# Altium footprint library Package_DFN_QFN.PcbLib: 735 footprints (part 30 of 46)
Each footprint in its own frame and in the unit in brackets; x right, y up, seen from the top. Pads: shape width x height; smd on the part's side, far side on the other; paste and mask are expansions set on the pad; w line width, h text height; cw(c..) or ccw(c..) is an arc to the next point about the centre after c.
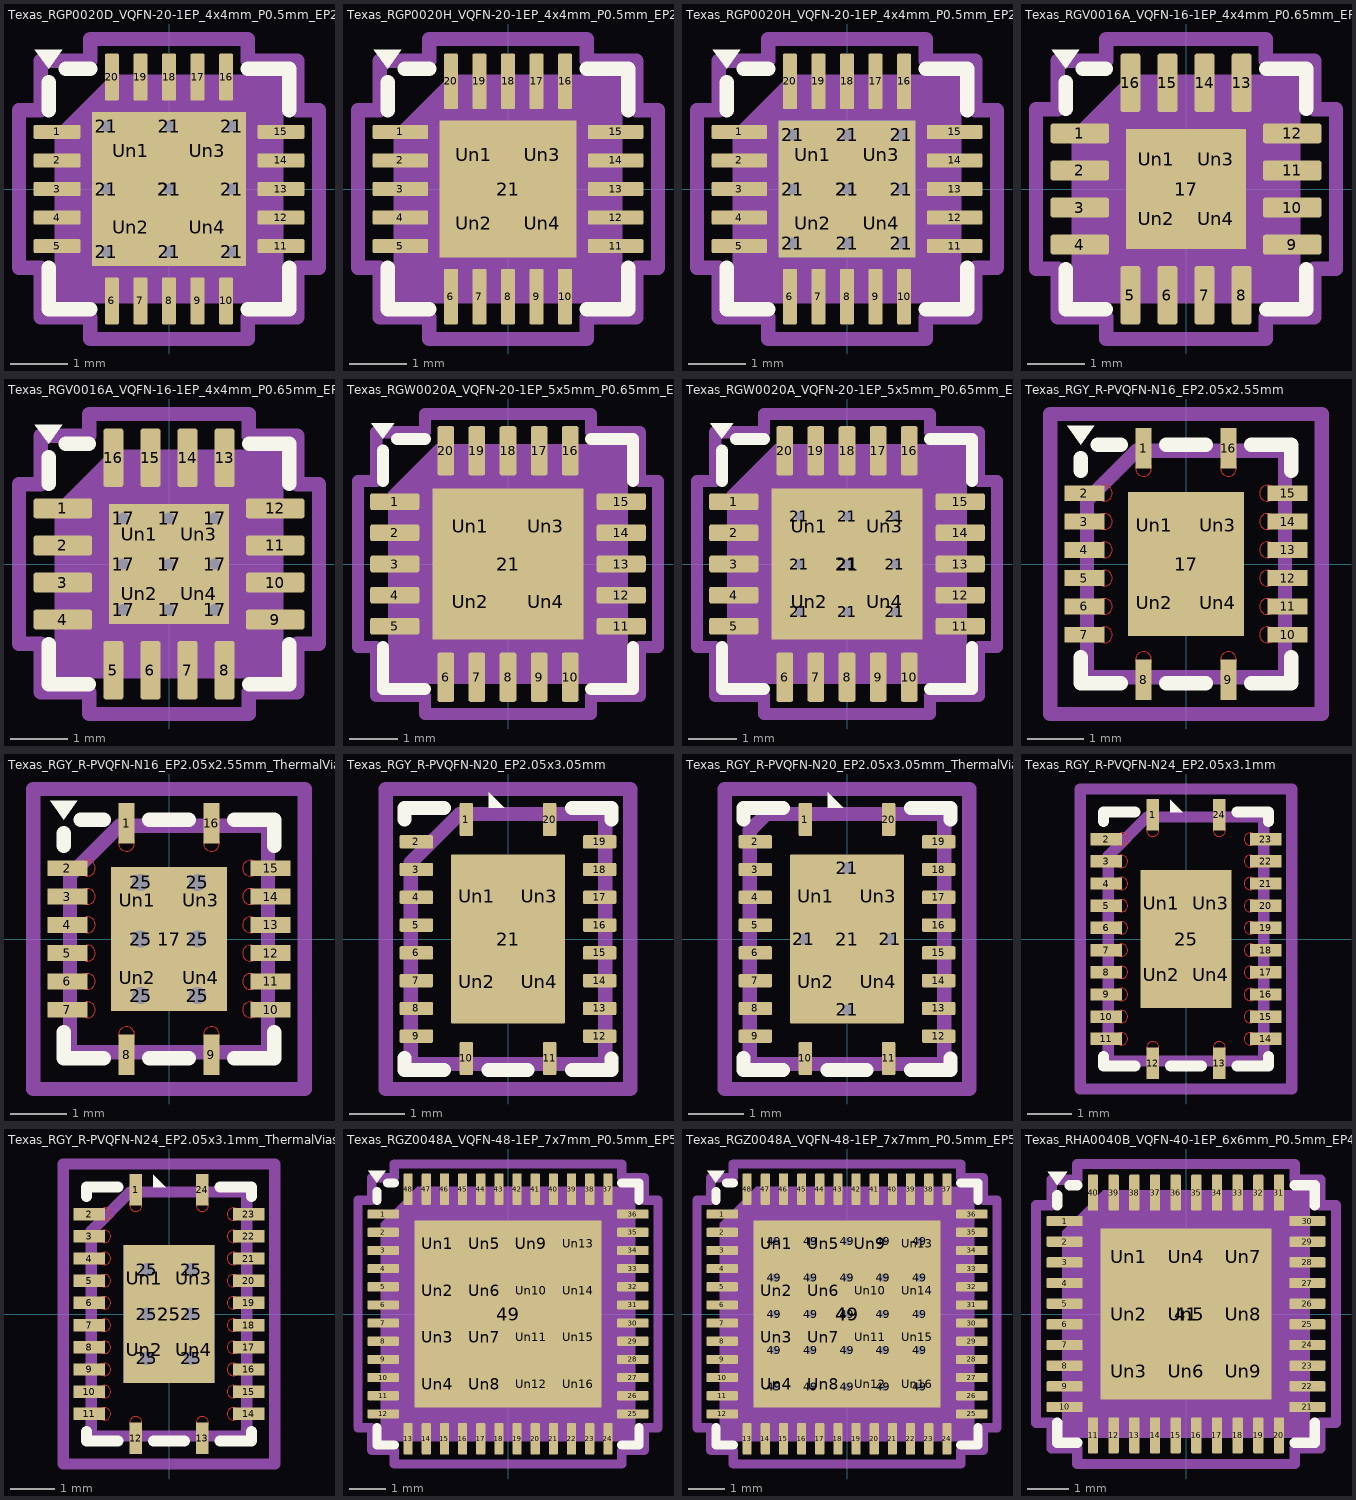
[diagram p29: the footprints below, top view; thin cyan lines are the x and y axes]

## Texas_RGP0020D_VQFN-20-1EP_4x4mm_P0.5mm_EP2.7x2.7mm_ThermalVias [mm] "Texas_RGP0020D_VQFN-20-1EP_4x4mm_P0.5mm_EP2.7x2.7mm_ThermalVias"
pads (35):
  rrect25% 0.825x0.25 smd: 1(-1.963,1) 2(-1.963,0.5) 3(-1.963,0) 4(-1.963,-0.5) 5(-1.963,-1) 11(1.963,-1) 12(1.963,-0.5) 13(1.963,0) 14(1.963,0.5) 15(1.963,1)
  rrect25% 0.25x0.825 smd: 6(-1,-1.963) 7(-0.5,-1.963) 8(0,-1.963) 9(0.5,-1.963) 10(1,-1.963) 16(1,1.963) 17(0.5,1.963) 18(0,1.963) 19(-0.5,1.963) 20(-1,1.963)
  round 0.5 hole 0.2: 21(-1.1,-1.1) 21(-1.1,0) 21(-1.1,1.1) 21(0,-1.1) 21(0,0) 21(0,1.1) 21(1.1,-1.1) 21(1.1,0) 21(1.1,1.1)
  rect 2.7x2.7 smd: 21(0,0)
  rect 2.7x2.7 smd far side: 21(0,0)
  rrect22% 1.13x1.13 on Top Paste: Un1(-0.675,0.675) Un2(-0.675,-0.675) Un3(0.675,0.675) Un4(0.675,-0.675)
F.SilkS:
  region: -2.11,2.11 -2.35,2.44 -1.87,2.44
  lines w0.254: -2.11,-1.385 -2.11,-2.11 -1.385,-2.11 ; -2.11,1.385 -2.11,1.87 ; -1.81,2.11 -1.385,2.11 ; 1.385,-2.11 2.11,-2.11 2.11,-1.385 ; 1.385,2.11 2.11,2.11 2.11,1.385
Top Component Center:
  lines w0.127: -0.127,0 0.127,0 -0.127,0 ; 0,-0.127 0,0.127 0,-0.127
Top Assembly:
  region: 2,-2 -2,-2 -2,1 -1,2 2,2
Top Courtyard:
  lines w0.254: -2.63,-1.38 -2.25,-1.38 -2.25,-2.25 -1.38,-2.25 -1.38,-2.63 1.38,-2.63 1.38,-2.25 2.25,-2.25 2.25,-1.38 2.63,-1.38 2.63,1.38 2.25,1.38 2.25,2.25 1.38,2.25 1.38,2.63 -1.38,2.63 -1.38,2.25 -2.25,2.25 -2.25,1.38 -2.63,1.38 -2.63,-1.38
Top Designator:
  text ".Designator" at -3.43,-0.344 h1.52

## Texas_RGP0020H_VQFN-20-1EP_4x4mm_P0.5mm_EP2.4x2.4mm [mm] "Texas_RGP0020H_VQFN-20-1EP_4x4mm_P0.5mm_EP2.4x2.4mm"
pads (25):
  rrect25% 0.975x0.25 smd: 1(-1.887,1) 2(-1.887,0.5) 3(-1.887,0) 4(-1.887,-0.5) 5(-1.887,-1) 11(1.887,-1) 12(1.887,-0.5) 13(1.887,0) 14(1.887,0.5) 15(1.887,1)
  rrect25% 0.25x0.975 smd: 6(-1,-1.887) 7(-0.5,-1.887) 8(0,-1.887) 9(0.5,-1.887) 10(1,-1.887) 16(1,1.887) 17(0.5,1.887) 18(0,1.887) 19(-0.5,1.887) 20(-1,1.887)
  rect 2.4x2.4 smd: 21(0,0)
  rrect25% 0.97x0.97 on Top Paste: Un1(-0.6,0.6) Un2(-0.6,-0.6) Un3(0.6,0.6) Un4(0.6,-0.6)
F.SilkS:
  region: -2.11,2.11 -2.35,2.44 -1.87,2.44
  lines w0.254: -2.11,-1.385 -2.11,-2.11 -1.385,-2.11 ; -2.11,1.385 -2.11,1.87 ; -1.81,2.11 -1.385,2.11 ; 1.385,-2.11 2.11,-2.11 2.11,-1.385 ; 1.385,2.11 2.11,2.11 2.11,1.385
Top Component Center:
  lines w0.127: -0.127,0 0.127,0 -0.127,0 ; 0,-0.127 0,0.127 0,-0.127
Top Assembly:
  region: 2,-2 -2,-2 -2,1 -1,2 2,2
Top Courtyard:
  lines w0.254: -2.63,-1.38 -2.25,-1.38 -2.25,-2.25 -1.38,-2.25 -1.38,-2.63 1.38,-2.63 1.38,-2.25 2.25,-2.25 2.25,-1.38 2.63,-1.38 2.63,1.38 2.25,1.38 2.25,2.25 1.38,2.25 1.38,2.63 -1.38,2.63 -1.38,2.25 -2.25,2.25 -2.25,1.38 -2.63,1.38 -2.63,-1.38
Top Designator:
  text ".Designator" at -3.43,-0.344 h1.52
3D body "Texas_RGP0020H_VQFN-20-1EP_4x4mm_P0.5mm_EP2.4x2.4mm.step": height 0.8, standoff 0, extent -2,-2 2,2

## Texas_RGP0020H_VQFN-20-1EP_4x4mm_P0.5mm_EP2.4x2.4mm_ThermalVias [mm] "Texas_RGP0020H_VQFN-20-1EP_4x4mm_P0.5mm_EP2.4x2.4mm_ThermalVias"
pads (35):
  rrect25% 0.975x0.25 smd: 1(-1.887,1) 2(-1.887,0.5) 3(-1.887,0) 4(-1.887,-0.5) 5(-1.887,-1) 11(1.887,-1) 12(1.887,-0.5) 13(1.887,0) 14(1.887,0.5) 15(1.887,1)
  rrect25% 0.25x0.975 smd: 6(-1,-1.887) 7(-0.5,-1.887) 8(0,-1.887) 9(0.5,-1.887) 10(1,-1.887) 16(1,1.887) 17(0.5,1.887) 18(0,1.887) 19(-0.5,1.887) 20(-1,1.887)
  round 0.5 hole 0.2: 21(-0.95,-0.95) 21(-0.95,0) 21(-0.95,0.95) 21(0,-0.95) 21(0,0) 21(0,0.95) 21(0.95,-0.95) 21(0.95,0) 21(0.95,0.95)
  rect 2.4x2.4 smd: 21(0,0)
  rect 2.4x2.4 smd far side: 21(0,0)
  rrect25% 0.85x0.85 on Top Paste: Un1(-0.6,0.6) Un2(-0.6,-0.6) Un3(0.6,0.6) Un4(0.6,-0.6)
F.SilkS:
  region: -2.11,2.11 -2.35,2.44 -1.87,2.44
  lines w0.254: -2.11,-1.385 -2.11,-2.11 -1.385,-2.11 ; -2.11,1.385 -2.11,1.87 ; -1.81,2.11 -1.385,2.11 ; 1.385,-2.11 2.11,-2.11 2.11,-1.385 ; 1.385,2.11 2.11,2.11 2.11,1.385
Top Component Center:
  lines w0.127: -0.127,0 0.127,0 -0.127,0 ; 0,-0.127 0,0.127 0,-0.127
Top Assembly:
  region: 2,-2 -2,-2 -2,1 -1,2 2,2
Top Courtyard:
  lines w0.254: -2.63,-1.38 -2.63,1.38 -2.25,1.38 -2.25,2.25 -1.38,2.25 -1.38,2.63 1.38,2.63 1.38,2.25 2.25,2.25 2.25,1.38 2.63,1.38 2.63,-1.38 2.25,-1.38 2.25,-2.25 1.38,-2.25 1.38,-2.63 -1.38,-2.63 -1.38,-2.25 -2.25,-2.25 -2.25,-1.38 -2.63,-1.38
Top Designator:
  text ".Designator" at -3.43,-0.344 h1.52
3D body "Texas_RGP0020H_VQFN-20-1EP_4x4mm_P0.5mm_EP2.4x2.4mm.step": height 0.8, standoff 0, extent -2,-2 2,2

## Texas_RGV0016A_VQFN-16-1EP_4x4mm_P0.65mm_EP2.1x2.1mm [mm] "Texas_RGV0016A_VQFN-16-1EP_4x4mm_P0.65mm_EP2.1x2.1mm"
pads (21):
  rrect25% 1.025x0.35 smd: 1(-1.863,0.975) 2(-1.863,0.325) 3(-1.863,-0.325) 4(-1.863,-0.975) 9(1.863,-0.975) 10(1.863,-0.325) 11(1.863,0.325) 12(1.863,0.975)
  rrect25% 0.35x1.025 smd: 5(-0.975,-1.863) 6(-0.325,-1.863) 7(0.325,-1.863) 8(0.975,-1.863) 13(0.975,1.863) 14(0.325,1.863) 15(-0.325,1.863) 16(-0.975,1.863)
  rect 2.1x2.1 smd: 17(0,0)
  rrect25% 0.85x0.85 on Top Paste: Un1(-0.525,0.525) Un2(-0.525,-0.525) Un3(0.525,0.525) Un4(0.525,-0.525)
F.SilkS:
  region: -2.11,2.11 -2.35,2.44 -1.87,2.44
  lines w0.254: -2.11,-1.41 -2.11,-2.11 -1.41,-2.11 ; -2.11,1.41 -2.11,1.87 ; -1.81,2.11 -1.41,2.11 ; 1.41,-2.11 2.11,-2.11 2.11,-1.41 ; 1.41,2.11 2.11,2.11 2.11,1.41
Top Component Center:
  lines w0.127: -0.127,0 0.127,0 -0.127,0 ; 0,-0.127 0,0.127 0,-0.127
Top Assembly:
  region: 2,-2 -2,-2 -2,1 -1,2 2,2
Top Courtyard:
  lines w0.254: -2.63,-1.4 -2.25,-1.4 -2.25,-2.25 -1.4,-2.25 -1.4,-2.63 1.4,-2.63 1.4,-2.25 2.25,-2.25 2.25,-1.4 2.63,-1.4 2.63,1.4 2.25,1.4 2.25,2.25 1.4,2.25 1.4,2.63 -1.4,2.63 -1.4,2.25 -2.25,2.25 -2.25,1.4 -2.63,1.4 -2.63,-1.4
Top Designator:
  text ".Designator" at -3.43,-0.344 h1.52

## Texas_RGV0016A_VQFN-16-1EP_4x4mm_P0.65mm_EP2.1x2.1mm_ThermalVias [mm] "Texas_RGV0016A_VQFN-16-1EP_4x4mm_P0.65mm_EP2.1x2.1mm_ThermalVias"
pads (31):
  rrect25% 1.025x0.35 smd: 1(-1.863,0.975) 2(-1.863,0.325) 3(-1.863,-0.325) 4(-1.863,-0.975) 9(1.863,-0.975) 10(1.863,-0.325) 11(1.863,0.325) 12(1.863,0.975)
  rrect25% 0.35x1.025 smd: 5(-0.975,-1.863) 6(-0.325,-1.863) 7(0.325,-1.863) 8(0.975,-1.863) 13(0.975,1.863) 14(0.325,1.863) 15(-0.325,1.863) 16(-0.975,1.863)
  round 0.5 hole 0.2: 17(-0.8,-0.8) 17(-0.8,0) 17(-0.8,0.8) 17(0,-0.8) 17(0,0) 17(0,0.8) 17(0.8,-0.8) 17(0.8,0) 17(0.8,0.8)
  rect 2.1x2.1 smd: 17(0,0)
  rect 2.1x2.1 smd far side: 17(0,0)
  rrect25% 0.91x0.91 on Top Paste: Un1(-0.525,0.525) Un2(-0.525,-0.525) Un3(0.525,0.525) Un4(0.525,-0.525)
F.SilkS:
  region: -2.11,2.11 -2.35,2.44 -1.87,2.44
  lines w0.254: -2.11,-1.41 -2.11,-2.11 -1.41,-2.11 ; -2.11,1.41 -2.11,1.87 ; -1.81,2.11 -1.41,2.11 ; 1.41,-2.11 2.11,-2.11 2.11,-1.41 ; 1.41,2.11 2.11,2.11 2.11,1.41
Top Component Center:
  lines w0.127: -0.127,0 0.127,0 -0.127,0 ; 0,-0.127 0,0.127 0,-0.127
Top Assembly:
  region: 2,-2 -2,-2 -2,1 -1,2 2,2
Top Courtyard:
  lines w0.254: -2.63,-1.4 -2.25,-1.4 -2.25,-2.25 -1.4,-2.25 -1.4,-2.63 1.4,-2.63 1.4,-2.25 2.25,-2.25 2.25,-1.4 2.63,-1.4 2.63,1.4 2.25,1.4 2.25,2.25 1.4,2.25 1.4,2.63 -1.4,2.63 -1.4,2.25 -2.25,2.25 -2.25,1.4 -2.63,1.4 -2.63,-1.4
Top Designator:
  text ".Designator" at -3.43,-0.344 h1.52

## Texas_RGW0020A_VQFN-20-1EP_5x5mm_P0.65mm_EP3.15x3.15mm [mm] "Texas_RGW0020A_VQFN-20-1EP_5x5mm_P0.65mm_EP3.15x3.15mm"
pads (25):
  rrect25% 1.025x0.35 smd: 1(-2.362,1.3) 2(-2.362,0.65) 3(-2.362,0) 4(-2.362,-0.65) 5(-2.362,-1.3) 11(2.362,-1.3) 12(2.362,-0.65) 13(2.362,0) 14(2.362,0.65) 15(2.362,1.3)
  rrect25% 0.35x1.025 smd: 6(-1.3,-2.362) 7(-0.65,-2.362) 8(0,-2.362) 9(0.65,-2.362) 10(1.3,-2.362) 16(1.3,2.362) 17(0.65,2.362) 18(0,2.362) 19(-0.65,2.362) 20(-1.3,2.362)
  rect 3.15x3.15 smd: 21(0,0)
  rrect20% 1.27x1.27 on Top Paste: Un1(-0.79,0.79) Un2(-0.79,-0.79) Un3(0.79,0.79) Un4(0.79,-0.79)
F.SilkS:
  region: -2.61,2.61 -2.85,2.94 -2.37,2.94
  lines w0.254: -2.61,-1.735 -2.61,-2.61 -1.735,-2.61 ; -2.61,1.735 -2.61,2.37 ; -2.31,2.61 -1.735,2.61 ; 1.735,-2.61 2.61,-2.61 2.61,-1.735 ; 1.735,2.61 2.61,2.61 2.61,1.735
Top Component Center:
  lines w0.127: -0.127,0 0.127,0 -0.127,0 ; 0,-0.127 0,0.127 0,-0.127
Top Assembly:
  region: 2.5,-2.5 -2.5,-2.5 -2.5,1.5 -1.5,2.5 2.5,2.5
Top Courtyard:
  lines w0.254: -3.13,-1.73 -2.75,-1.73 -2.75,-2.75 -1.73,-2.75 -1.73,-3.13 1.73,-3.13 1.73,-2.75 2.75,-2.75 2.75,-1.73 3.13,-1.73 3.13,1.73 2.75,1.73 2.75,2.75 1.73,2.75 1.73,3.13 -1.73,3.13 -1.73,2.75 -2.75,2.75 -2.75,1.73 -3.13,1.73 -3.13,-1.73
Top Designator:
  text ".Designator" at -3.43,-0.344 h1.52
3D body "Texas_RGW0020A_VQFN-20-1EP_5x5mm_P0.65mm_EP3.15x3.15mm.step": height 0.8, standoff 0, extent -2.5,-2.5 2.5,2.5

## Texas_RGW0020A_VQFN-20-1EP_5x5mm_P0.65mm_EP3.15x3.15mm_ThermalVias [mm] "Texas_RGW0020A_VQFN-20-1EP_5x5mm_P0.65mm_EP3.15x3.15mm_ThermalVias"
pads (35):
  rrect25% 1.025x0.35 smd: 1(-2.362,1.3) 2(-2.362,0.65) 3(-2.362,0) 4(-2.362,-0.65) 5(-2.362,-1.3) 11(2.362,-1.3) 12(2.362,-0.65) 13(2.362,0) 14(2.362,0.65) 15(2.362,1.3)
  rrect25% 0.35x1.025 smd: 6(-1.3,-2.362) 7(-0.65,-2.362) 8(0,-2.362) 9(0.65,-2.362) 10(1.3,-2.362) 16(1.3,2.362) 17(0.65,2.362) 18(0,2.362) 19(-0.65,2.362) 20(-1.3,2.362)
  round 0.5 hole 0.2: 21(-1,-1) 21(-1,0) 21(-1,1) 21(0,-1) 21(0,0) 21(0,1) 21(1,-1) 21(1,0) 21(1,1)
  rect 3.15x3.15 smd: 21(0,0)
  rect 2.5x2.5 smd far side: 21(0,0)
  rrect20% 1.27x1.27 on Top Paste: Un1(-0.79,0.79) Un2(-0.79,-0.79) Un3(0.79,0.79) Un4(0.79,-0.79)
F.SilkS:
  region: -2.61,2.61 -2.85,2.94 -2.37,2.94
  lines w0.254: -2.61,-1.735 -2.61,-2.61 -1.735,-2.61 ; -2.61,1.735 -2.61,2.37 ; -2.31,2.61 -1.735,2.61 ; 1.735,-2.61 2.61,-2.61 2.61,-1.735 ; 1.735,2.61 2.61,2.61 2.61,1.735
Top Component Center:
  lines w0.127: -0.127,0 0.127,0 -0.127,0 ; 0,-0.127 0,0.127 0,-0.127
Top Assembly:
  region: 2.5,-2.5 -2.5,-2.5 -2.5,1.5 -1.5,2.5 2.5,2.5
Top Courtyard:
  lines w0.254: -3.13,-1.73 -2.75,-1.73 -2.75,-2.75 -1.73,-2.75 -1.73,-3.13 1.73,-3.13 1.73,-2.75 2.75,-2.75 2.75,-1.73 3.13,-1.73 3.13,1.73 2.75,1.73 2.75,2.75 1.73,2.75 1.73,3.13 -1.73,3.13 -1.73,2.75 -2.75,2.75 -2.75,1.73 -3.13,1.73 -3.13,-1.73
Top Designator:
  text ".Designator" at -3.43,-0.344 h1.52
3D body "Texas_RGW0020A_VQFN-20-1EP_5x5mm_P0.65mm_EP3.15x3.15mm.step": height 0.8, standoff 0, extent -2.5,-2.5 2.5,2.5

## Texas_RGY_R-PVQFN-N16_EP2.05x2.55mm [mm] "Texas_RGY_R-PVQFN-N16_EP2.05x2.55mm"
pads (21):
  rect 0.28x0.71 smd: 1(-0.75,2.045) 8(-0.75,-2.045) 9(0.75,-2.045) 16(0.75,2.045)
  rect 0.71x0.28 smd: 2(-1.795,1.25) 3(-1.795,0.75) 4(-1.795,0.25) 5(-1.795,-0.25) 6(-1.795,-0.75) 7(-1.795,-1.25) 10(1.795,-1.25) 11(1.795,-0.75) 12(1.795,-0.25) 13(1.795,0.25) 14(1.795,0.75) 15(1.795,1.25)
  rect 2.05x2.55 smd: 17(0,0)
  rect 0.82x1.07 on Top Paste: Un1(-0.56,0.685) Un2(-0.56,-0.685) Un3(0.56,0.685) Un4(0.56,-0.685)
F.Cu:
  circle w0: c0.75,1.69 r0.14
  circle w0: c1.44,1.25 r0.14
  circle w0: c1.44,0.75 r0.14
  circle w0: c1.44,0.25 r0.14
  circle w0: c1.44,-0.25 r0.14
  circle w0: c1.44,-0.75 r0.14
  circle w0: c1.44,-1.25 r0.14
  circle w0: c0.75,-1.69 r0.14
  circle w0: c-0.75,-1.69 r0.14
  circle w0: c-1.44,-1.25 r0.14
  circle w0: c-1.44,-0.75 r0.14
  circle w0: c-1.44,-0.25 r0.14
  circle w0: c-1.44,0.25 r0.14
  circle w0: c-1.44,0.75 r0.14
  circle w0: c-1.44,1.25 r0.14
  circle w0: c-0.75,1.69 r0.14
F.SilkS:
  region: -1.86,2.11 -2.1,2.44 -1.62,2.44
  lines w0.254: -1.86,-1.65 -1.86,-2.11 -1.15,-2.11 ; -1.86,1.65 -1.86,1.87 ; -1.56,2.11 -1.15,2.11 ; -0.35,-2.11 0.35,-2.11 ; -0.35,2.11 0.35,2.11 ; 1.15,-2.11 1.86,-2.11 1.86,-1.65 ; 1.15,2.11 1.86,2.11 1.86,1.65
F.Paste:
  circle w0: c0.75,1.69 r0.14
  circle w0: c1.44,1.25 r0.14
  circle w0: c1.44,0.75 r0.14
  circle w0: c1.44,0.25 r0.14
  circle w0: c1.44,-0.25 r0.14
  circle w0: c1.44,-0.75 r0.14
  circle w0: c1.44,-1.25 r0.14
  circle w0: c0.75,-1.69 r0.14
  circle w0: c-0.75,-1.69 r0.14
  circle w0: c-1.44,-1.25 r0.14
  circle w0: c-1.44,-0.75 r0.14
  circle w0: c-1.44,-0.25 r0.14
  circle w0: c-1.44,0.25 r0.14
  circle w0: c-1.44,0.75 r0.14
  circle w0: c-1.44,1.25 r0.14
  circle w0: c-0.75,1.69 r0.14
F.Mask:
  circle w0: c0.75,1.69 r0.14
  circle w0: c1.44,1.25 r0.14
  circle w0: c1.44,0.75 r0.14
  circle w0: c1.44,0.25 r0.14
  circle w0: c1.44,-0.25 r0.14
  circle w0: c1.44,-0.75 r0.14
  circle w0: c1.44,-1.25 r0.14
  circle w0: c0.75,-1.69 r0.14
  circle w0: c-0.75,-1.69 r0.14
  circle w0: c-1.44,-1.25 r0.14
  circle w0: c-1.44,-0.75 r0.14
  circle w0: c-1.44,-0.25 r0.14
  circle w0: c-1.44,0.25 r0.14
  circle w0: c-1.44,0.75 r0.14
  circle w0: c-1.44,1.25 r0.14
  circle w0: c-0.75,1.69 r0.14
Top Component Center:
  lines w0.127: -0.127,0 0.127,0 -0.127,0 ; 0,-0.127 0,0.127 0,-0.127
Top Assembly:
  lines w0.254: -1.75,-2 1.75,-2 1.75,2 -0.875,2 -1.75,1.125 -1.75,-2
Top Courtyard:
  lines w0.254: -2.4,-2.65 2.4,-2.65 2.4,2.65 -2.4,2.65 -2.4,-2.65
Top Designator:
  text ".Designator" at -3.43,-0.344 h1.52

## Texas_RGY_R-PVQFN-N16_EP2.05x2.55mm_ThermalVias [mm] "Texas_RGY_R-PVQFN-N16_EP2.05x2.55mm_ThermalVias"
pads (27):
  rect 0.28x0.71 smd: 1(-0.75,2.045) 8(-0.75,-2.045) 9(0.75,-2.045) 16(0.75,2.045)
  rect 0.71x0.28 smd: 2(-1.795,1.25) 3(-1.795,0.75) 4(-1.795,0.25) 5(-1.795,-0.25) 6(-1.795,-0.75) 7(-1.795,-1.25) 10(1.795,-1.25) 11(1.795,-0.75) 12(1.795,-0.25) 13(1.795,0.25) 14(1.795,0.75) 15(1.795,1.25)
  rect 2.05x2.55 smd: 17(0,0)
  round 0.5 hole 0.3: 25(-0.5,-1) 25(-0.5,0) 25(-0.5,1) 25(0.5,-1) 25(0.5,0) 25(0.5,1)
  rect 0.82x1.07 on Top Paste: Un1(-0.56,0.685) Un2(-0.56,-0.685) Un3(0.56,0.685) Un4(0.56,-0.685)
F.Cu:
  circle w0: c0.75,1.69 r0.14
  circle w0: c1.44,1.25 r0.14
  circle w0: c1.44,0.75 r0.14
  circle w0: c1.44,0.25 r0.14
  circle w0: c1.44,-0.25 r0.14
  circle w0: c1.44,-0.75 r0.14
  circle w0: c1.44,-1.25 r0.14
  circle w0: c0.75,-1.69 r0.14
  circle w0: c-0.75,-1.69 r0.14
  circle w0: c-1.44,-1.25 r0.14
  circle w0: c-1.44,-0.75 r0.14
  circle w0: c-1.44,-0.25 r0.14
  circle w0: c-1.44,0.25 r0.14
  circle w0: c-1.44,0.75 r0.14
  circle w0: c-1.44,1.25 r0.14
  circle w0: c-0.75,1.69 r0.14
F.SilkS:
  region: -1.86,2.11 -2.1,2.44 -1.62,2.44
  lines w0.254: -1.86,-1.65 -1.86,-2.11 -1.15,-2.11 ; -1.86,1.65 -1.86,1.87 ; -1.56,2.11 -1.15,2.11 ; -0.35,-2.11 0.35,-2.11 ; -0.35,2.11 0.35,2.11 ; 1.15,-2.11 1.86,-2.11 1.86,-1.65 ; 1.15,2.11 1.86,2.11 1.86,1.65
F.Paste:
  circle w0: c0.75,1.69 r0.14
  circle w0: c1.44,1.25 r0.14
  circle w0: c1.44,0.75 r0.14
  circle w0: c1.44,0.25 r0.14
  circle w0: c1.44,-0.25 r0.14
  circle w0: c1.44,-0.75 r0.14
  circle w0: c1.44,-1.25 r0.14
  circle w0: c0.75,-1.69 r0.14
  circle w0: c-0.75,-1.69 r0.14
  circle w0: c-1.44,-1.25 r0.14
  circle w0: c-1.44,-0.75 r0.14
  circle w0: c-1.44,-0.25 r0.14
  circle w0: c-1.44,0.25 r0.14
  circle w0: c-1.44,0.75 r0.14
  circle w0: c-1.44,1.25 r0.14
  circle w0: c-0.75,1.69 r0.14
F.Mask:
  circle w0: c0.75,1.69 r0.14
  circle w0: c1.44,1.25 r0.14
  circle w0: c1.44,0.75 r0.14
  circle w0: c1.44,0.25 r0.14
  circle w0: c1.44,-0.25 r0.14
  circle w0: c1.44,-0.75 r0.14
  circle w0: c1.44,-1.25 r0.14
  circle w0: c0.75,-1.69 r0.14
  circle w0: c-0.75,-1.69 r0.14
  circle w0: c-1.44,-1.25 r0.14
  circle w0: c-1.44,-0.75 r0.14
  circle w0: c-1.44,-0.25 r0.14
  circle w0: c-1.44,0.25 r0.14
  circle w0: c-1.44,0.75 r0.14
  circle w0: c-1.44,1.25 r0.14
  circle w0: c-0.75,1.69 r0.14
Top Component Center:
  lines w0.127: -0.127,0 0.127,0 -0.127,0 ; 0,-0.127 0,0.127 0,-0.127
Top Assembly:
  lines w0.254: -1.75,-2 1.75,-2 1.75,2 -0.875,2 -1.75,1.125 -1.75,-2
Top Courtyard:
  lines w0.254: -2.4,-2.65 2.4,-2.65 2.4,2.65 -2.4,2.65 -2.4,-2.65
Top Designator:
  text ".Designator" at -3.43,-0.344 h1.52

## Texas_RGY_R-PVQFN-N20_EP2.05x3.05mm [mm] "Texas_RGY_R-PVQFN-N20_EP2.05x3.05mm"
pads (25):
  rrect21% 0.24x0.6 smd: 1(-0.75,2.15) 10(-0.75,-2.15) 11(0.75,-2.15) 20(0.75,2.15)
  rrect21% 0.6x0.24 smd: 2(-1.65,1.75) 3(-1.65,1.25) 4(-1.65,0.75) 5(-1.65,0.25) 6(-1.65,-0.25) 7(-1.65,-0.75) 8(-1.65,-1.25) 9(-1.65,-1.75) 12(1.65,-1.75) 13(1.65,-1.25) 14(1.65,-0.75) 15(1.65,-0.25) 16(1.65,0.25) 17(1.65,0.75) 18(1.65,1.25) 19(1.65,1.75)
  rrect2% 2.05x3.05 smd: 21(0,0)
  rect 0.92x1.33 on Top Paste: Un1(-0.56,0.77) Un2(-0.56,-0.77) Un3(0.56,0.77) Un4(0.56,-0.77)
F.SilkS:
  region: -0.07,2.36 -0.35,2.36 -0.35,2.64
  lines w0.254: -1.86,-2.145 -1.86,-2.355 -1.15,-2.355 ; -1.86,2.15 -1.86,2.36 -1.15,2.36 ; -0.35,-2.36 0.35,-2.36 ; 1.15,-2.36 1.86,-2.36 1.86,-2.15 ; 1.15,2.36 1.86,2.36 1.86,2.15
Top Component Center:
  lines w0.127: -0.127,0 0.127,0 -0.127,0 ; 0,-0.127 0,0.127 0,-0.127
Top Assembly:
  lines w0.254: -1.75,-2.25 1.75,-2.25 1.75,2.25 -0.875,2.25 -1.75,1.375 -1.75,-2.25
Top Courtyard:
  lines w0.254: -2.2,-2.7 2.2,-2.7 2.2,2.7 -2.2,2.7 -2.2,-2.7
Top Designator:
  text ".Designator" at -3.43,-0.344 h1.52
3D body "Texas_RGY_R-PVQFN-N20_EP2.05x3.05mm.step": height 0.92, standoff 0, extent -1.75,-2.25 1.75,2.25

## Texas_RGY_R-PVQFN-N20_EP2.05x3.05mm_ThermalVias [mm] "Texas_RGY_R-PVQFN-N20_EP2.05x3.05mm_ThermalVias"
pads (29):
  rrect21% 0.24x0.6 smd: 1(-0.75,2.15) 10(-0.75,-2.15) 11(0.75,-2.15) 20(0.75,2.15)
  rrect21% 0.6x0.24 smd: 2(-1.65,1.75) 3(-1.65,1.25) 4(-1.65,0.75) 5(-1.65,0.25) 6(-1.65,-0.25) 7(-1.65,-0.75) 8(-1.65,-1.25) 9(-1.65,-1.75) 12(1.65,-1.75) 13(1.65,-1.25) 14(1.65,-0.75) 15(1.65,-0.25) 16(1.65,0.25) 17(1.65,0.75) 18(1.65,1.25) 19(1.65,1.75)
  round 0.5 hole 0.2: 21(-0.775,0) 21(0,-1.275) 21(0,1.275) 21(0.775,0)
  rrect2% 2.05x3.05 smd: 21(0,0)
  rect 0.92x1.33 on Top Paste: Un1(-0.56,0.77) Un2(-0.56,-0.77) Un3(0.56,0.77) Un4(0.56,-0.77)
F.SilkS:
  region: -0.07,2.36 -0.35,2.36 -0.35,2.64
  lines w0.254: -1.86,-2.145 -1.86,-2.355 -1.15,-2.355 ; -1.86,2.15 -1.86,2.36 -1.15,2.36 ; -0.35,-2.36 0.35,-2.36 ; 1.15,-2.36 1.86,-2.36 1.86,-2.15 ; 1.15,2.36 1.86,2.36 1.86,2.15
Top Component Center:
  lines w0.127: -0.127,0 0.127,0 -0.127,0 ; 0,-0.127 0,0.127 0,-0.127
Top Assembly:
  lines w0.254: -1.75,-2.25 1.75,-2.25 1.75,2.25 -1.45,2.25 -1.75,1.95 -1.75,-2.25
Top Courtyard:
  lines w0.254: -2.2,-2.7 2.2,-2.7 2.2,2.7 -2.2,2.7 -2.2,-2.7
Top Designator:
  text ".Designator" at -3.43,-0.344 h1.52
3D body "Texas_RGY_R-PVQFN-N20_EP2.05x3.05mm.step": height 0.92, standoff 0, extent -1.75,-2.25 1.75,2.25

## Texas_RGY_R-PVQFN-N24_EP2.05x3.1mm [mm] "Texas_RGY_R-PVQFN-N24_EP2.05x3.1mm"
pads (29):
  rect 0.28x0.71 smd: 1(-0.75,2.795) 12(-0.75,-2.795) 13(0.75,-2.795) 24(0.75,2.795)
  rect 0.71x0.28 smd: 2(-1.795,2.25) 3(-1.795,1.75) 4(-1.795,1.25) 5(-1.795,0.75) 6(-1.795,0.25) 7(-1.795,-0.25) 8(-1.795,-0.75) 9(-1.795,-1.25) 10(-1.795,-1.75) 11(-1.795,-2.25) 14(1.795,-2.25) 15(1.795,-1.75) 16(1.795,-1.25) 17(1.795,-0.75) 18(1.795,-0.25) 19(1.795,0.25) 20(1.795,0.75) 21(1.795,1.25) 22(1.795,1.75) 23(1.795,2.25)
  rect 2.05x3.1 smd: 25(0,0)
  rect 0.82x1.32 on Top Paste: Un1(-0.56,0.81) Un2(-0.56,-0.81) Un3(0.56,0.81) Un4(0.56,-0.81)
F.Cu:
  circle w0: c0.75,2.452 r0.14
  circle w0: c1.452,2.25 r0.14
  circle w0: c1.452,1.75 r0.14
  circle w0: c1.452,1.25 r0.14
  circle w0: c1.452,0.75 r0.14
  circle w0: c1.452,0.25 r0.14
  circle w0: c1.452,-0.25 r0.14
  circle w0: c1.452,-0.75 r0.14
  circle w0: c1.452,-1.25 r0.14
  circle w0: c1.452,-1.75 r0.14
  circle w0: c1.452,-2.25 r0.14
  circle w0: c0.75,-2.452 r0.14
  circle w0: c-0.75,-2.452 r0.14
  circle w0: c-1.452,-2.25 r0.14
  circle w0: c-1.452,-1.75 r0.14
  circle w0: c-1.452,-1.25 r0.14
  circle w0: c-1.452,-0.75 r0.14
  circle w0: c-1.452,-0.25 r0.14
  circle w0: c-1.452,0.25 r0.14
  circle w0: c-1.452,0.75 r0.14
  circle w0: c-1.452,1.25 r0.14
  circle w0: c-1.452,1.75 r0.14
  circle w0: c-1.44,2.25 r0.14
  circle w0: c-0.75,2.452 r0.14
F.SilkS:
  region: -0.07,2.86 -0.35,2.86 -0.35,3.14
  lines w0.254: -1.86,-2.65 -1.86,-2.86 -1.15,-2.86 ; -1.86,2.65 -1.86,2.86 -1.15,2.86 ; -0.35,-2.86 0.35,-2.86 ; 1.15,-2.86 1.86,-2.86 1.86,-2.65 ; 1.15,2.86 1.86,2.86 1.86,2.65
F.Paste:
  circle w0: c0.75,2.452 r0.14
  circle w0: c1.452,2.25 r0.14
  circle w0: c1.452,1.75 r0.14
  circle w0: c1.452,1.25 r0.14
  circle w0: c1.452,0.75 r0.14
  circle w0: c1.452,0.25 r0.14
  circle w0: c1.452,-0.25 r0.14
  circle w0: c1.452,-0.75 r0.14
  circle w0: c1.452,-1.25 r0.14
  circle w0: c1.452,-1.75 r0.14
  circle w0: c1.452,-2.25 r0.14
  circle w0: c0.75,-2.452 r0.14
  circle w0: c-0.75,-2.452 r0.14
  circle w0: c-1.452,-2.25 r0.14
  circle w0: c-1.452,-1.75 r0.14
  circle w0: c-1.452,-1.25 r0.14
  circle w0: c-1.452,-0.75 r0.14
  circle w0: c-1.452,-0.25 r0.14
  circle w0: c-1.452,0.25 r0.14
  circle w0: c-1.452,0.75 r0.14
  circle w0: c-1.452,1.25 r0.14
  circle w0: c-1.452,1.75 r0.14
  circle w0: c-1.44,2.25 r0.14
  circle w0: c-0.75,2.452 r0.14
F.Mask:
  circle w0: c0.75,2.452 r0.14
  circle w0: c1.452,2.25 r0.14
  circle w0: c1.452,1.75 r0.14
  circle w0: c1.452,1.25 r0.14
  circle w0: c1.452,0.75 r0.14
  circle w0: c1.452,0.25 r0.14
  circle w0: c1.452,-0.25 r0.14
  circle w0: c1.452,-0.75 r0.14
  circle w0: c1.452,-1.25 r0.14
  circle w0: c1.452,-1.75 r0.14
  circle w0: c1.452,-2.25 r0.14
  circle w0: c0.75,-2.452 r0.14
  circle w0: c-0.75,-2.452 r0.14
  circle w0: c-1.452,-2.25 r0.14
  circle w0: c-1.452,-1.75 r0.14
  circle w0: c-1.452,-1.25 r0.14
  circle w0: c-1.452,-0.75 r0.14
  circle w0: c-1.452,-0.25 r0.14
  circle w0: c-1.452,0.25 r0.14
  circle w0: c-1.452,0.75 r0.14
  circle w0: c-1.452,1.25 r0.14
  circle w0: c-1.452,1.75 r0.14
  circle w0: c-1.44,2.25 r0.14
  circle w0: c-0.75,2.452 r0.14
Top Component Center:
  lines w0.127: -0.127,0 0.127,0 -0.127,0 ; 0,-0.127 0,0.127 0,-0.127
Top Assembly:
  lines w0.254: -1.75,-2.75 1.75,-2.75 1.75,2.75 -0.875,2.75 -1.75,1.875 -1.75,-2.75
Top Courtyard:
  lines w0.254: -2.38,-3.38 2.38,-3.38 2.38,3.38 -2.38,3.38 -2.38,-3.38
Top Designator:
  text ".Designator" at -3.43,-0.344 h1.52
3D body "Texas_RGY_R-PVQFN-N24_EP2.05x3.1mm.step": height 0.92, standoff 0, extent -1.75,-2.75 1.75,2.75

## Texas_RGY_R-PVQFN-N24_EP2.05x3.1mm_ThermalVias [mm] "Texas_RGY_R-PVQFN-N24_EP2.05x3.1mm_ThermalVias"
pads (36):
  rect 0.28x0.71 smd: 1(-0.75,2.795) 12(-0.75,-2.795) 13(0.75,-2.795) 24(0.75,2.795)
  rect 0.71x0.28 smd: 2(-1.795,2.25) 3(-1.795,1.75) 4(-1.795,1.25) 5(-1.795,0.75) 6(-1.795,0.25) 7(-1.795,-0.25) 8(-1.795,-0.75) 9(-1.795,-1.25) 10(-1.795,-1.75) 11(-1.795,-2.25) 14(1.795,-2.25) 15(1.795,-1.75) 16(1.795,-1.25) 17(1.795,-0.75) 18(1.795,-0.25) 19(1.795,0.25) 20(1.795,0.75) 21(1.795,1.25) 22(1.795,1.75) 23(1.795,2.25)
  round 0.6 hole 0.3: 25(-0.5,-1) 25(-0.5,0) 25(-0.5,1) 25(0.5,-1) 25(0.5,0) 25(0.5,1)
  rect 2.05x3.1 smd: 25(0,0)
  rect 2.05x3.1 smd far side: 25(0,0)
  rect 0.82x1.32 on Top Paste: Un1(-0.56,0.81) Un2(-0.56,-0.81) Un3(0.56,0.81) Un4(0.56,-0.81)
F.Cu:
  circle w0: c0.75,2.452 r0.14
  circle w0: c1.452,2.25 r0.14
  circle w0: c1.452,1.75 r0.14
  circle w0: c1.452,1.25 r0.14
  circle w0: c1.452,0.75 r0.14
  circle w0: c1.452,0.25 r0.14
  circle w0: c1.452,-0.25 r0.14
  circle w0: c1.452,-0.75 r0.14
  circle w0: c1.452,-1.25 r0.14
  circle w0: c1.452,-1.75 r0.14
  circle w0: c1.452,-2.25 r0.14
  circle w0: c0.75,-2.452 r0.14
  circle w0: c-0.75,-2.452 r0.14
  circle w0: c-1.452,-2.25 r0.14
  circle w0: c-1.452,-1.75 r0.14
  circle w0: c-1.452,-1.25 r0.14
  circle w0: c-1.452,-0.75 r0.14
  circle w0: c-1.452,-0.25 r0.14
  circle w0: c-1.452,0.25 r0.14
  circle w0: c-1.452,0.75 r0.14
  circle w0: c-1.452,1.25 r0.14
  circle w0: c-1.452,1.75 r0.14
  circle w0: c-1.44,2.25 r0.14
  circle w0: c-0.75,2.452 r0.14
F.SilkS:
  region: -0.07,2.86 -0.35,2.86 -0.35,3.14
  lines w0.254: -1.86,-2.65 -1.86,-2.86 -1.15,-2.86 ; -1.86,2.65 -1.86,2.86 -1.15,2.86 ; -0.35,-2.86 0.35,-2.86 ; 1.15,-2.86 1.86,-2.86 1.86,-2.65 ; 1.15,2.86 1.86,2.86 1.86,2.65
F.Paste:
  circle w0: c0.75,2.452 r0.14
  circle w0: c1.452,2.25 r0.14
  circle w0: c1.452,1.75 r0.14
  circle w0: c1.452,1.25 r0.14
  circle w0: c1.452,0.75 r0.14
  circle w0: c1.452,0.25 r0.14
  circle w0: c1.452,-0.25 r0.14
  circle w0: c1.452,-0.75 r0.14
  circle w0: c1.452,-1.25 r0.14
  circle w0: c1.452,-1.75 r0.14
  circle w0: c1.452,-2.25 r0.14
  circle w0: c0.75,-2.452 r0.14
  circle w0: c-0.75,-2.452 r0.14
  circle w0: c-1.452,-2.25 r0.14
  circle w0: c-1.452,-1.75 r0.14
  circle w0: c-1.452,-1.25 r0.14
  circle w0: c-1.452,-0.75 r0.14
  circle w0: c-1.452,-0.25 r0.14
  circle w0: c-1.452,0.25 r0.14
  circle w0: c-1.452,0.75 r0.14
  circle w0: c-1.452,1.25 r0.14
  circle w0: c-1.452,1.75 r0.14
  circle w0: c-1.44,2.25 r0.14
  circle w0: c-0.75,2.452 r0.14
F.Mask:
  circle w0: c0.75,2.452 r0.14
  circle w0: c1.452,2.25 r0.14
  circle w0: c1.452,1.75 r0.14
  circle w0: c1.452,1.25 r0.14
  circle w0: c1.452,0.75 r0.14
  circle w0: c1.452,0.25 r0.14
  circle w0: c1.452,-0.25 r0.14
  circle w0: c1.452,-0.75 r0.14
  circle w0: c1.452,-1.25 r0.14
  circle w0: c1.452,-1.75 r0.14
  circle w0: c1.452,-2.25 r0.14
  circle w0: c0.75,-2.452 r0.14
  circle w0: c-0.75,-2.452 r0.14
  circle w0: c-1.452,-2.25 r0.14
  circle w0: c-1.452,-1.75 r0.14
  circle w0: c-1.452,-1.25 r0.14
  circle w0: c-1.452,-0.75 r0.14
  circle w0: c-1.452,-0.25 r0.14
  circle w0: c-1.452,0.25 r0.14
  circle w0: c-1.452,0.75 r0.14
  circle w0: c-1.452,1.25 r0.14
  circle w0: c-1.452,1.75 r0.14
  circle w0: c-1.44,2.25 r0.14
  circle w0: c-0.75,2.452 r0.14
Top Component Center:
  lines w0.127: -0.127,0 0.127,0 -0.127,0 ; 0,-0.127 0,0.127 0,-0.127
Top Assembly:
  lines w0.254: -1.75,-2.75 1.75,-2.75 1.75,2.75 -0.875,2.75 -1.75,1.875 -1.75,-2.75
Top Courtyard:
  lines w0.254: -2.38,-3.38 2.38,-3.38 2.38,3.38 -2.38,3.38 -2.38,-3.38
Top Designator:
  text ".Designator" at -3.43,-0.344 h1.52
3D body "Texas_RGY_R-PVQFN-N24_EP2.05x3.1mm.step": height 0.92, standoff 0, extent -1.75,-2.75 1.75,2.75

## Texas_RGZ0048A_VQFN-48-1EP_7x7mm_P0.5mm_EP5.15x5.15mm [mm] "Texas_RGZ0048A_VQFN-48-1EP_7x7mm_P0.5mm_EP5.15x5.15mm"
pads (65):
  rrect25% 0.875x0.25 smd: 1(-3.437,2.75) 2(-3.437,2.25) 3(-3.437,1.75) 4(-3.437,1.25) 5(-3.437,0.75) 6(-3.437,0.25) 7(-3.437,-0.25) 8(-3.437,-0.75) 9(-3.437,-1.25) 10(-3.437,-1.75) 11(-3.437,-2.25) 12(-3.437,-2.75) 25(3.437,-2.75) 26(3.437,-2.25) 27(3.437,-1.75) 28(3.437,-1.25) 29(3.437,-0.75) 30(3.437,-0.25) 31(3.437,0.25) 32(3.437,0.75) 33(3.437,1.25) 34(3.437,1.75) 35(3.437,2.25) 36(3.437,2.75)
  rrect25% 0.25x0.875 smd: 13(-2.75,-3.437) 14(-2.25,-3.437) 15(-1.75,-3.437) 16(-1.25,-3.437) 17(-0.75,-3.437) 18(-0.25,-3.437) 19(0.25,-3.437) 20(0.75,-3.437) 21(1.25,-3.437) 22(1.75,-3.437) 23(2.25,-3.437) 24(2.75,-3.437) 37(2.75,3.437) 38(2.25,3.437) 39(1.75,3.437) 40(1.25,3.437) 41(0.75,3.437) 42(0.25,3.437) 43(-0.25,3.437) 44(-0.75,3.437) 45(-1.25,3.437) 46(-1.75,3.437) 47(-2.25,3.437) 48(-2.75,3.437)
  rect 5.15x5.15 smd: 49(0,0)
  rrect24% 1.04x1.04 on Top Paste: Un1(-1.935,1.935) Un2(-1.935,0.645) Un3(-1.935,-0.645) Un4(-1.935,-1.935) Un5(-0.645,1.935) Un6(-0.645,0.645) Un7(-0.645,-0.645) Un8(-0.645,-1.935) Un9(0.645,1.935) Un10(0.645,0.645) Un11(0.645,-0.645) Un12(0.645,-1.935) Un13(1.935,1.935) Un14(1.935,0.645) Un15(1.935,-0.645) Un16(1.935,-1.935)
F.SilkS:
  region: -3.61,3.61 -3.85,3.94 -3.37,3.94
  lines w0.254: -3.61,-3.135 -3.61,-3.61 -3.135,-3.61 ; -3.61,3.135 -3.61,3.37 ; -3.31,3.61 -3.135,3.61 ; 3.135,-3.61 3.61,-3.61 3.61,-3.135 ; 3.135,3.61 3.61,3.61 3.61,3.135
Top Component Center:
  lines w0.127: -0.127,0 0.127,0 -0.127,0 ; 0,-0.127 0,0.127 0,-0.127
Top Assembly:
  region: 3.5,-3.5 -3.5,-3.5 -3.5,2.5 -2.5,3.5 3.5,3.5
Top Courtyard:
  lines w0.254: -4.13,-3.13 -3.75,-3.13 -3.75,-3.75 -3.13,-3.75 -3.13,-4.13 3.13,-4.13 3.13,-3.75 3.75,-3.75 3.75,-3.13 4.13,-3.13 4.13,3.13 3.75,3.13 3.75,3.75 3.13,3.75 3.13,4.13 -3.13,4.13 -3.13,3.75 -3.75,3.75 -3.75,3.13 -4.13,3.13 -4.13,-3.13
Top Designator:
  text ".Designator" at -3.43,-0.344 h1.52
3D body "Texas_RGZ0048A_VQFN-48-1EP_7x7mm_P0.5mm_EP5.15x5.15mm.step": height 0.8, standoff 0, extent -3.5,-3.5 3.5,3.5

## Texas_RGZ0048A_VQFN-48-1EP_7x7mm_P0.5mm_EP5.15x5.15mm_ThermalVias [mm] "Texas_RGZ0048A_VQFN-48-1EP_7x7mm_P0.5mm_EP5.15x5.15mm_ThermalVias"
pads (91):
  rrect25% 0.875x0.25 smd: 1(-3.437,2.75) 2(-3.437,2.25) 3(-3.437,1.75) 4(-3.437,1.25) 5(-3.437,0.75) 6(-3.437,0.25) 7(-3.437,-0.25) 8(-3.437,-0.75) 9(-3.437,-1.25) 10(-3.437,-1.75) 11(-3.437,-2.25) 12(-3.437,-2.75) 25(3.437,-2.75) 26(3.437,-2.25) 27(3.437,-1.75) 28(3.437,-1.25) 29(3.437,-0.75) 30(3.437,-0.25) 31(3.437,0.25) 32(3.437,0.75) 33(3.437,1.25) 34(3.437,1.75) 35(3.437,2.25) 36(3.437,2.75)
  rrect25% 0.25x0.875 smd: 13(-2.75,-3.437) 14(-2.25,-3.437) 15(-1.75,-3.437) 16(-1.25,-3.437) 17(-0.75,-3.437) 18(-0.25,-3.437) 19(0.25,-3.437) 20(0.75,-3.437) 21(1.25,-3.437) 22(1.75,-3.437) 23(2.25,-3.437) 24(2.75,-3.437) 37(2.75,3.437) 38(2.25,3.437) 39(1.75,3.437) 40(1.25,3.437) 41(0.75,3.437) 42(0.25,3.437) 43(-0.25,3.437) 44(-0.75,3.437) 45(-1.25,3.437) 46(-1.75,3.437) 47(-2.25,3.437) 48(-2.75,3.437)
  round 0.5 hole 0.2: 49(-2,-2) 49(-2,-1) 49(-2,0) 49(-2,1) 49(-2,2) 49(-1,-2) 49(-1,-1) 49(-1,0) 49(-1,1) 49(-1,2) 49(0,-2) 49(0,-1) 49(0,0) 49(0,1) 49(0,2) 49(1,-2) 49(1,-1) 49(1,0) 49(1,1) 49(1,2) 49(2,-2) 49(2,-1) 49(2,0) 49(2,1) 49(2,2)
  rect 5.15x5.15 smd: 49(0,0)
  rect 4.5x4.5 smd far side: 49(0,0)
  rrect24% 1.04x1.04 on Top Paste: Un1(-1.935,1.935) Un2(-1.935,0.645) Un3(-1.935,-0.645) Un4(-1.935,-1.935) Un5(-0.645,1.935) Un6(-0.645,0.645) Un7(-0.645,-0.645) Un8(-0.645,-1.935) Un9(0.645,1.935) Un10(0.645,0.645) Un11(0.645,-0.645) Un12(0.645,-1.935) Un13(1.935,1.935) Un14(1.935,0.645) Un15(1.935,-0.645) Un16(1.935,-1.935)
F.SilkS:
  region: -3.61,3.61 -3.85,3.94 -3.37,3.94
  lines w0.254: -3.61,-3.135 -3.61,-3.61 -3.135,-3.61 ; -3.61,3.135 -3.61,3.37 ; -3.31,3.61 -3.135,3.61 ; 3.135,-3.61 3.61,-3.61 3.61,-3.135 ; 3.135,3.61 3.61,3.61 3.61,3.135
Top Component Center:
  lines w0.127: -0.127,0 0.127,0 -0.127,0 ; 0,-0.127 0,0.127 0,-0.127
Top Assembly:
  region: 3.5,-3.5 -3.5,-3.5 -3.5,2.5 -2.5,3.5 3.5,3.5
Top Courtyard:
  lines w0.254: -4.13,-3.13 -3.75,-3.13 -3.75,-3.75 -3.13,-3.75 -3.13,-4.13 3.13,-4.13 3.13,-3.75 3.75,-3.75 3.75,-3.13 4.13,-3.13 4.13,3.13 3.75,3.13 3.75,3.75 3.13,3.75 3.13,4.13 -3.13,4.13 -3.13,3.75 -3.75,3.75 -3.75,3.13 -4.13,3.13 -4.13,-3.13
Top Designator:
  text ".Designator" at -3.43,-0.344 h1.52
3D body "Texas_RGZ0048A_VQFN-48-1EP_7x7mm_P0.5mm_EP5.15x5.15mm.step": height 0.8, standoff 0, extent -3.5,-3.5 3.5,3.5

## Texas_RHA0040B_VQFN-40-1EP_6x6mm_P0.5mm_EP4.15x4.15mm [mm] "Texas_RHA0040B_VQFN-40-1EP_6x6mm_P0.5mm_EP4.15x4.15mm"
pads (50):
  rrect25% 0.875x0.25 smd: 1(-2.937,2.25) 2(-2.937,1.75) 3(-2.937,1.25) 4(-2.937,0.75) 5(-2.937,0.25) 6(-2.937,-0.25) 7(-2.937,-0.75) 8(-2.937,-1.25) 9(-2.937,-1.75) 10(-2.937,-2.25) 21(2.937,-2.25) 22(2.937,-1.75) 23(2.937,-1.25) 24(2.937,-0.75) 25(2.937,-0.25) 26(2.937,0.25) 27(2.937,0.75) 28(2.937,1.25) 29(2.937,1.75) 30(2.937,2.25)
  rrect25% 0.25x0.875 smd: 11(-2.25,-2.937) 12(-1.75,-2.937) 13(-1.25,-2.937) 14(-0.75,-2.937) 15(-0.25,-2.937) 16(0.25,-2.937) 17(0.75,-2.937) 18(1.25,-2.937) 19(1.75,-2.937) 20(2.25,-2.937) 31(2.25,2.937) 32(1.75,2.937) 33(1.25,2.937) 34(0.75,2.937) 35(0.25,2.937) 36(-0.25,2.937) 37(-0.75,2.937) 38(-1.25,2.937) 39(-1.75,2.937) 40(-2.25,2.937)
  rect 4.15x4.15 smd: 41(0,0)
  rrect22% 1.12x1.12 on Top Paste: Un1(-1.38,1.38) Un2(-1.38,0) Un3(-1.38,-1.38) Un4(0,1.38) Un5(0,0) Un6(0,-1.38) Un7(1.38,1.38) Un8(1.38,0) Un9(1.38,-1.38)
F.SilkS:
  region: -3.11,3.11 -3.35,3.44 -2.87,3.44
  lines w0.254: -3.11,-2.635 -3.11,-3.11 -2.635,-3.11 ; -3.11,2.635 -3.11,2.87 ; -2.81,3.11 -2.635,3.11 ; 2.635,-3.11 3.11,-3.11 3.11,-2.635 ; 2.635,3.11 3.11,3.11 3.11,2.635
Top Component Center:
  lines w0.127: -0.127,0 0.127,0 -0.127,0 ; 0,-0.127 0,0.127 0,-0.127
Top Assembly:
  region: 3,-3 -3,-3 -3,2 -2,3 3,3
Top Courtyard:
  lines w0.254: -3.63,-2.63 -3.25,-2.63 -3.25,-3.25 -2.63,-3.25 -2.63,-3.63 2.63,-3.63 2.63,-3.25 3.25,-3.25 3.25,-2.63 3.63,-2.63 3.63,2.63 3.25,2.63 3.25,3.25 2.63,3.25 2.63,3.63 -2.63,3.63 -2.63,3.25 -3.25,3.25 -3.25,2.63 -3.63,2.63 -3.63,-2.63
Top Designator:
  text ".Designator" at -3.43,-0.344 h1.52